# Altium schematic symbol library BSS138-G.SchLib: 1 symbol
Pins are listed as number, name and electrical type; pins without a type are passive.

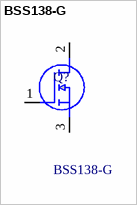
[diagram p0: symbol BSS138-G]

## BSS138-G
designator Q?
MOSFET FET 50V 3.5 OHM; Manufacturer_Name: onsemi; Geometry.Height: 1.11mm; Mouser Part Number: 863-BSS138-G; Mouser Price/Stock: https://www.mouser.co.uk/ProductDetail/onsemi/BSS138-G?qs=UkDUCjYnTB3VwCqWT1Cb%2FQ%3D%3D; Manufacturer_Part_Number: BSS138-G; Datasheet Link: https://www.mouser.co.uk/datasheet/2/308/BSS138-D-1658842.pdf
footprint SOT96P237X111-3N
pins: 1 G, 2 D, 3 S